# Altium integrated library VIETTIEN.IntLib: 167 symbols (part 1 of 8)
Pins are listed as number, name and electrical type; pins without a type are passive.

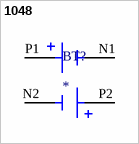
[diagram p0: symbol 1048]

## 1048
designator BT?
Battery Holder (Open) 18650 2 Cell SMD (SMT) Tab; MF: Keystone Electronics; MP: 1048; SnapEDA_Link: https://www.snapeda.com/parts/1048/Keystone/view-part/?ref=snap; Package: None; Value: *; Check_prices: https://www.snapeda.com/parts/1048/Keystone/view-part/?ref=eda
footprint BAT_1048
pins: N1, N2, P1, P2


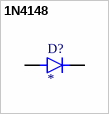
[diagram p1: symbol 1N4148]

## 1N4148
designator D?
Diode Standard 75V 200mA Surface Mount SOD-523F; MF: onsemi; MP: 1N4148; SnapEDA_Link: https://www.snapeda.com/parts/1N4148/Onsemi/view-part/?ref=snap; Package: AXIAL LEAD-2 ON Semiconductor; Value: *; Check_prices: https://www.snapeda.com/parts/1N4148/Onsemi/view-part/?ref=eda
footprint DIOAD753W49L380D172B
pins: A, K


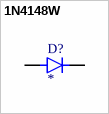
[diagram p2: symbol 1N4148W]

## 1N4148W
designator D?
Small Signal Diode, SOD-123F, 100V, 0.15A, 150Â°C; MF: Diotec Semiconductor; MP: 1N4148W; SnapEDA_Link: https://www.snapeda.com/parts/1N4148W/Diotec/view-part/?ref=snap; Package: SOD-123F Diotec; Value: *; Check_prices: https://www.snapeda.com/parts/1N4148W/Diotec/view-part/?ref=eda
footprint SODFL3816X120N
pins: A, C K


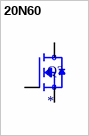
[diagram p3: symbol 20N60]

## 20N60
designator Q?
footprint TO253P1057X470X2040-3
pins: 1 G, 1 D, 2 D, 2 D, 2 D, 3 S


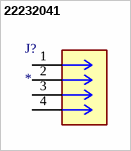
[diagram p4: symbol 22232041]

## 22232041
designator J?
Conn Wire to Board HDR 4 POS 2.54mm Solder ST Top Entry Thru-Hole KKÂ® Bag; MF: Molex; MP: 22232041; SnapEDA_Link: https://www.snapeda.com/parts/22232041/Molex/view-part/?ref=snap; Package: None; Value: *; Check_prices: https://www.snapeda.com/parts/22232041/Molex/view-part/?ref=eda
footprint CONN_A-6373-04A_MOL
pins: 1, 2, 3, 4


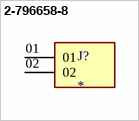
[diagram p5: symbol 2-796658-8]

## 2-796658-8
designator J?
Barrier Terminal Blocks; MF: TE Connectivity; MP: 2-796658-8; SnapEDA_Link: https://www.snapeda.com/parts/2-796658-8/TE+Connectivity/view-part/?ref=snap; Package: None; Value: *; EU_RoHS_Compliance: Compliant; Check_prices: https://www.snapeda.com/parts/2-796658-8/TE+Connectivity/view-part/?ref=eda
footprint TE_2-796658-8
pins: 01, 02


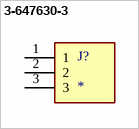
[diagram p6: symbol 3-647630-3]

## 3-647630-3
designator J?
Conn Wire to Board HDR 3 POS 2.54mm Solder RA Thru-Hole Bag; MF: TE Connectivity; MP: 3-647630-3; SnapEDA_Link: https://www.snapeda.com/parts/3-647630-3/TE+Connectivity/view-part/?ref=snap; Package: None; Value: *; EU_RoHS_Compliance: Compliant; Check_prices: https://www.snapeda.com/parts/3-647630-3/TE+Connectivity/view-part/?ref=eda
footprint TE_3-647630-3
pins: 1, 2, 3


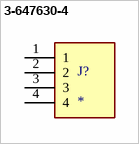
[diagram p7: symbol 3-647630-4]

## 3-647630-4
designator J?
Circular Connector, 04P MTA100 HRD ASSY F/L LF MTA-100 Series | TE Connectivity 3-647630-4; SnapEDA_Link: https://www.snapeda.com/parts/3-647630-4/TE+Connectivity/view-part/?ref=snap; Package: None; Value: *; MF: TE Connectivity; MP: 3-647630-4; EU_RoHS_Compliance: Compliant; Check_prices: https://www.snapeda.com/parts/3-647630-4/TE+Connectivity/view-part/?ref=eda
footprint TE_3-647630-4
pins: 1, 2, 3, 4


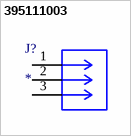
[diagram p8: symbol 395111003]

## 395111003
designator J?
3 Position Terminal Block Header, Male Pins, Shrouded (4 Side) 0.150 (3.81mm) Vertical Through Hole; MF: Molex; MP: 395111003; SnapEDA_Link: https://www.snapeda.com/parts/395111003/Molex/view-part/?ref=snap; Package: None; Value: *; Check_prices: https://www.snapeda.com/parts/395111003/Molex/view-part/?ref=eda
footprint CONN_SD-39511-001_03P_MOL
pins: 1, 2, 3


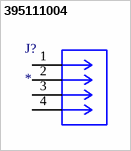
[diagram p9: symbol 395111004]

## 395111004
designator J?
Conn Shrouded Header (4 Sides) HDR 4 POS 3.81mm Solder ST Top Entry Thru-Hole Eurostyle; MF: Molex; MP: 395111004; SnapEDA_Link: https://www.snapeda.com/parts/395111004/Molex/view-part/?ref=snap; Package: None; Value: *; Check_prices: https://www.snapeda.com/parts/395111004/Molex/view-part/?ref=eda
footprint CONN_SD-39511-001_04P_MOL
pins: 1, 2, 3, 4


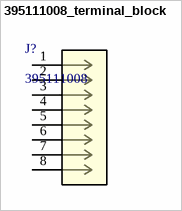
[diagram p10: symbol 395111008_terminal_block]

## 395111008_terminal_block
designator J?, comment 395111008
3.81mm Pitch Eurostyle Vertical PCB Header, 8 Circuits; Manufacturer_Name: Molex Connector Corporation; Copyright: Copyright (C) 2025 Ultra Librarian. All rights reserved.; Manufacturer_Part_Number: 395111008; RefDes: RefDes; Type: Type
footprint terminal_block_8_male
pins: 1, 2, 3, 4, 5, 6, 7, 8


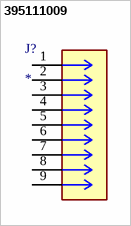
[diagram p11: symbol 395111009]

## 395111009
designator J?
MP: 395111009; Package: None; Price: None; Value: *; Availability: Unavailable
footprint CONN_39511-1009_MOL
pins: 1, 2, 3, 4, 5, 6, 7, 8, 9


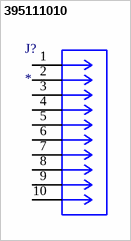
[diagram p12: symbol 395111010]

## 395111010
designator J?
Pluggable Terminal Blocks 3.81MM EURO HEADER V EADER VERT BLK 10CKT; MF: Molex; MP: 395111010; SnapEDA_Link: https://www.snapeda.com/parts/395111010/Molex/view-part/?ref=snap; Package: None; Value: *; Check_prices: https://www.snapeda.com/parts/395111010/Molex/view-part/?ref=eda
footprint CONN_SD-39511-001_10P_MOL
pins: 1, 2, 3, 4, 5, 6, 7, 8, 9, 10


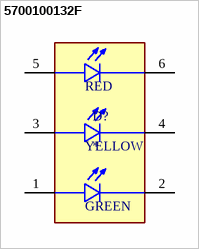
[diagram p13: symbol 5700100132F]

## 5700100132F
designator D?
Indicator,LED PCB Thru-Hole Bulb 2 mm Red/Yellow/Green Diffused, Tinted Round | Dialight 570-0100-132F; SnapEDA_Link: https://www.snapeda.com/parts/570-0100-132F/Dialight/view-part/?ref=snap; Package: D2PAK Dialight; Value: *; MF: Dialight; MP: 570-0100-132F; Check_prices: https://www.snapeda.com/parts/570-0100-132F/Dialight/view-part/?ref=eda
footprint LED_5700100132F
pins: 1 A_GREEN, 2 C_GREEN, 3 A_YELLOW, 4 C_YELLOW, 5 A_RED, 6 C_RED
text: RED; YELLOW; GREEN


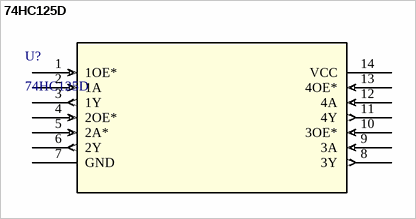
[diagram p14: symbol 74HC125D]

## 74HC125D
designator U?
Description; Manufacturer_Name: Nexperia; Copyright: Copyright (C) 2025 Ultra Librarian. All rights reserved.; Manufacturer_Part_Number: 74HC125D; RefDes: RefDes; Type: Type
footprint SOT108-1_NEX
pins: 1 1OE* (in), 2 1A (in), 3 1Y (out), 4 2OE* (in), 5 2A* (in), 6 2Y (out), 7 GND (power), 8 3Y (out), 9 3A (in), 10 3OE* (in), 11 4Y (out), 12 4A (in), 13 4OE* (in), 14 VCC (power)


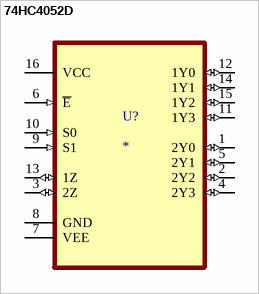
[diagram p15: symbol 74HC4052D]

## 74HC4052D
designator U?
2 Circuit IC Switch 4:1 130Ohm 16-SOIC; MF: Toshiba; MP: 74HC4052D; SnapEDA_Link: https://www.snapeda.com/parts/74HC4052D/Toshiba/view-part/?ref=snap; Package: SOIC-16 NXP Semiconductors; Value: *; Check_prices: https://www.snapeda.com/parts/74HC4052D/Toshiba/view-part/?ref=eda
footprint SOIC127P600X175-16N
pins: 1 2Y0 (io), 2 2Y2 (io), 3 2Z (io), 4 2Y3 (io), 5 2Y1 (io), 6 ~{E} (in), 7 VEE (power), 8 GND, 9 S1 (in), 10 S0 (in), 11 1Y3 (io), 12 1Y0 (io), 13 1Z (io), 14 1Y1 (io), 15 1Y2 (io), 16 VCC (power)


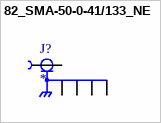
[diagram p16: symbol 82_SMA-50-0-41/133_NE]

## 82_SMA-50-0-41/133_NE
designator J?
RF Connectors / Coaxial Connectors, Straight Pcb Jack | HUBER+SUHNER 82_SMA-50-0-41/133_NE; SnapEDA_Link: https://www.snapeda.com/parts/82_SMA-50-0-41/133_NE/Huber%252BSuhner/view-part/?ref=snap; Package: None; Value: *; MF: HUBER+SUHNER; MP: 82_SMA-50-0-41/133_NE; Check_prices: https://www.snapeda.com/parts/82_SMA-50-0-41/133_NE/Huber%252BSuhner/view-part/?ref=eda
footprint HUBER+SUHNER_82_SMA-50-0-41/133_NE
pins: 1, G1 (power), G2 (power), G3 (power), G4 (power)


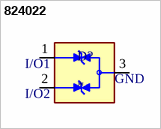
[diagram p17: symbol 824022]

## 824022
designator D?
8V Clamp 8A (8/20µs) Ipp Tvs Diode Surface Mount SOT-23-3L, / WE-TVS_SOT23-3L_824022, / 824022 /; MF: {'manufacturer': u'W\xfcrth Elektronik'}; MP: 824022; Package: None; Price: None; Value: *; Availability: Unavailable
footprint WE-TVS_SOT23-3L
pins: 1 I/O1, 2 I/O2, 3 GND


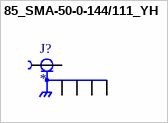
[diagram p18: symbol 85_SMA-50-0-144/111_YH]

## 85_SMA-50-0-144/111_YH
designator J?
RF Connector, SMA Right angle PCB jack(f) | HUBER+SUHNER 85_SMA-50-0-144/111_YH; SnapEDA_Link: https://www.snapeda.com/parts/85_SMA-50-0-144/111_YH/Huber%252BSuhner/view-part/?ref=snap; Package: None; Value: *; MF: HUBER+SUHNER; MP: 85_SMA-50-0-144/111_YH; Check_prices: https://www.snapeda.com/parts/85_SMA-50-0-144/111_YH/Huber%252BSuhner/view-part/?ref=eda
footprint HUBER+SUHNER_85_SMA-50-0-144/111_YH
pins: 1, G1 (power), G2 (power), G3 (power), G4 (power)


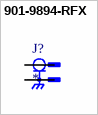
[diagram p19: symbol 901-9894-RFX]

## 901-9894-RFX
designator J?
SMA Connector Plug, Male Pin 50Ohm Through Hole, Right Angle Solder; MF: Amphenol RF; MP: 901-9894-RFX; Purchase-URL: https://pricing.snapeda.com/search/part/901-9894-RFX/?ref=eda; Value: *; SnapEDA_Link: https://www.snapeda.com/parts/901-9894-RFX/Amphenol/view-part/?ref=snap; Package: None; Check_prices: https://www.snapeda.com/parts/901-9894-RFX/Amphenol/view-part/?ref=eda; Price: None; Availability: In Stock
footprint AMPHENOL_901-9894-RFX
pins: 1, 2, 3 2, 4 2, 5 2


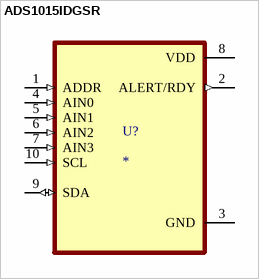
[diagram p20: symbol ADS1015IDGSR]

## ADS1015IDGSR
designator U?
12-bit, 3.3-kSPS, 4-channel, delta-sigma ADC with PGA, oscillator, VREF, comparator and I2C; MF: Texas Instruments; MP: ADS1015IDGSR; SnapEDA_Link: https://www.snapeda.com/parts/ADS1015IDGSR/Texas+Instruments/view-part/?ref=snap; Package: VSSOP-10 Texas Instruments; Value: *; Check_prices: https://www.snapeda.com/parts/ADS1015IDGSR/Texas+Instruments/view-part/?ref=eda
footprint SOP50P490X110-10N
pins: 1 ADDR (in), 2 ALERT/RDY (out), 3 GND (power), 4 AIN0 (in), 5 AIN1 (in), 6 AIN2 (in), 7 AIN3 (in), 8 VDD (power), 9 SDA (io), 10 SCL (in)


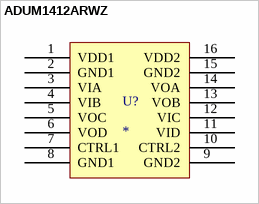
[diagram p21: symbol ADUM1412ARWZ]

## ADUM1412ARWZ
designator U?
Quad-Channel Digital Isolator
footprint SOIC127P1032X265-16N
pins: 1 VDD1, 2 GND1, 3 VIA, 4 VIB, 5 VOC, 6 VOD, 7 CTRL1, 8 GND1, 9 GND2, 10 CTRL2, 11 VID, 12 VIC, 13 VOB, 14 VOA, 15 GND2, 16 VDD2


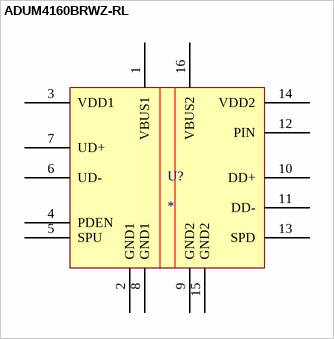
[diagram p22: symbol ADUM4160BRWZ-RL]

## ADUM4160BRWZ-RL
designator U?
ADUM4160BRWZ-RL
footprint SOIC127P1032X265-16N
pins: 1 VBUS1, 2 GND1, 3 VDD1, 4 PDEN, 5 SPU, 6 UD-, 7 UD+, 8 GND1, 9 GND2, 10 DD+, 11 DD-, 12 PIN, 13 SPD, 14 VDD2, 15 GND2, 16 VBUS2
